# Altium schematic symbol library PI5.extension.board.001.SCHLIB: 2 symbols
Pins are listed as number, name and electrical type; pins without a type are passive.

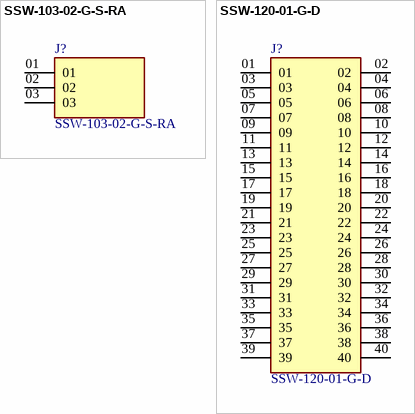
[diagram p0: symbols SSW-103-02-G-S-RA to SSW-120-01-G-D]

## SSW-103-02-G-S-RA
designator J?
MF: Samtec Inc.; Availability: Unavailable; Price: None; Package: None; Value: *; MP: SSW-103-02-G-S-RA
footprint SAMTEC_SSW-103-02-G-S-RA
pins: 01, 02, 03

## SSW-120-01-G-D
designator J?
MF: Samtec; Package: None; Availability: Unavailable; Value: *; MP: SSW-120-01-G-D; Price: None
footprint SAMTEC_SSW-120-01-G-D
pins: 01, 02, 03, 04, 05, 06, 07, 08, 09, 10, 11, 12, 13, 14, 15, 16, 17, 18, 19, 20, 21, 22, 23, 24, 25, 26, 27, 28, 29, 30, 31, 32, 33, 34, 35, 36, 37, 38, 39, 40